# Altium footprint library 2×2P跳线插针.PcbLib: 1 footprints
Each footprint in its own frame and in the unit in brackets; x right, y up, seen from the top. Pads: shape width x height; smd on the part's side, far side on the other; paste and mask are expansions set on the pad; w line width, h text height; cw(c..) or ccw(c..) is an arc to the next point about the centre after c.
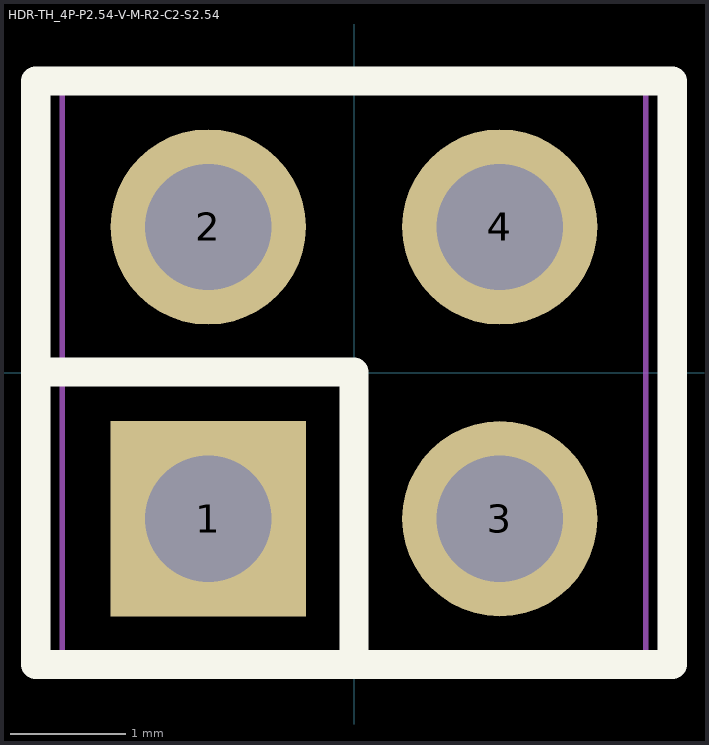
[diagram p0: the footprint, top view; thin cyan lines are the x and y axes]

## HDR-TH_4P-P2.54-V-M-R2-C2-S2.54 [mm]
pads (4):
  rect 1.7x1.7 hole 1.1: 1(-1.27,-1.27)
  round 1.7 hole 1.1: 2(-1.27,1.27) 3(1.27,-1.27) 4(1.27,1.27)
Top Overlay:
  lines w0.254: -2.77,0.007 0,0.007 0,-2.54 ; -2.77,-2.54 -2.77,2.54 2.77,2.54 2.77,-2.54 -2.77,-2.54
Mechanical 6:
  lines w0.051: -2.54,-2.5 -2.54,2.5 2.54,2.5 2.54,-2.5 -2.54,-2.5
Mechanical 8:
  region: -2.48,-2.5 -2.48,-2.525 -2.515,-2.56 -2.565,-2.56 -2.6,-2.525 -2.6,-2.5 -2.6,-2.475 -2.565,-2.44 -2.515,-2.44 -2.48,-2.475 -2.48,-2.5
Mechanical 9:
  region: -1.59,-0.95 -0.95,-0.95 -0.95,-1.59 -1.59,-1.59
  region: -1.59,1.59 -0.95,1.59 -0.95,0.95 -1.59,0.95
  region: 0.95,1.59 1.59,1.59 1.59,0.95 0.95,0.95
  region: 0.95,-0.95 1.59,-0.95 1.59,-1.59 0.95,-1.59